# Altium schematic symbol library BaseStation_1.SCHLIB: 202 symbols (part 1 of 2)
Pins are listed as number, name and electrical type; pins without a type are passive.

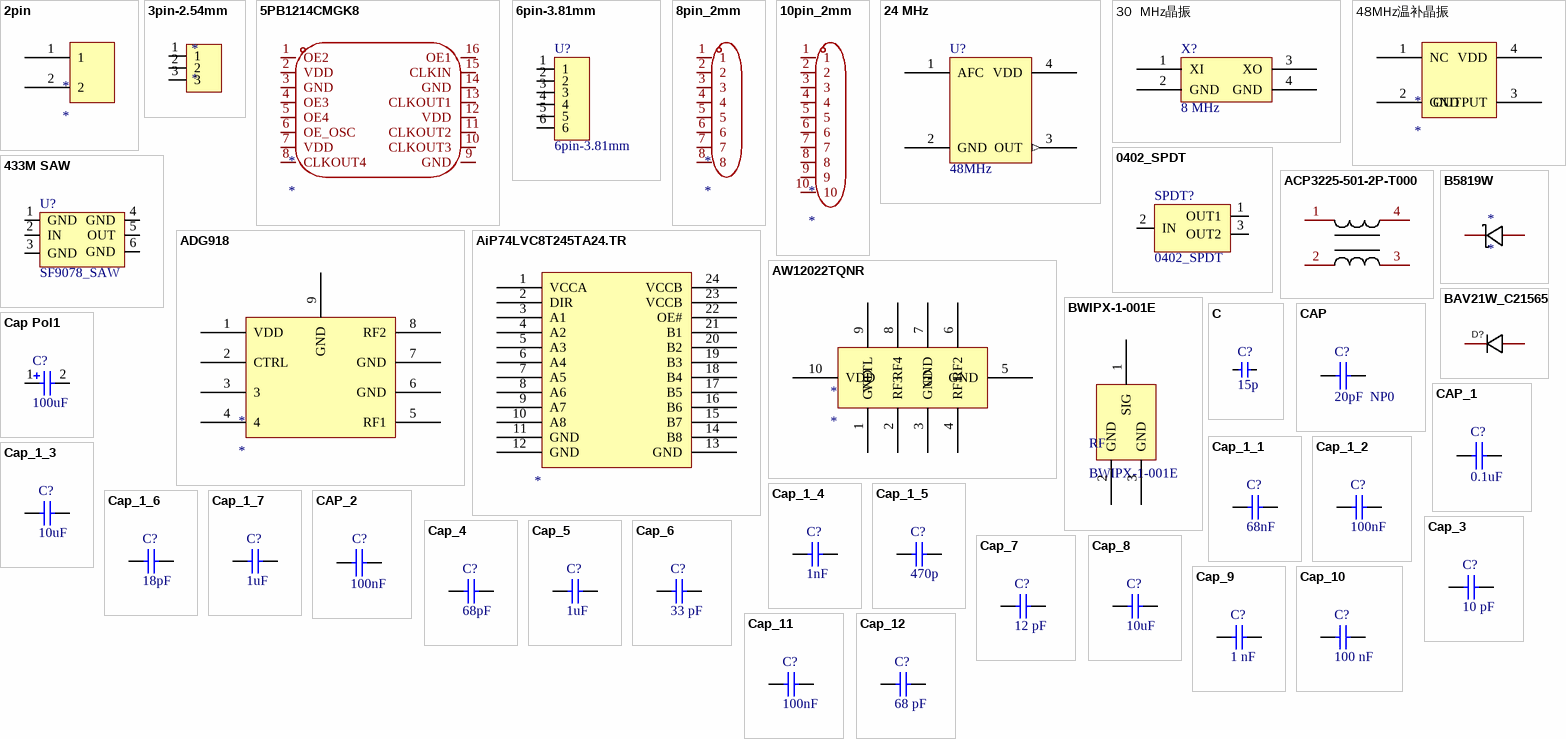
[diagram p0: symbols 2pin to Cap_12]

## 2pin
designator *
pins: 1, 2

## 3pin-2.54mm
designator *
pins: 1, 2, 3

## 5PB1214CMGK8
designator *
pins: 1 OE2, 2 VDD, 3 GND, 4 OE3, 5 OE4, 6 OE_OSC, 7 VDD, 8 CLKOUT4, 9 GND, 10 CLKOUT3, 11 CLKOUT2, 12 VDD, 13 CLKOUT1, 14 GND, 15 CLKIN, 16 OE1

## 6pin-3.81mm
designator U?
footprint 6pin-3.81mm
pins: 1, 2, 3, 4, 5, 6

## 8pin_2mm
designator *
pins: 1, 2, 3, 4, 5, 6, 7, 8

## 10pin_2mm
designator *
pins: 1, 2, 3, 4, 5, 6, 7, 8, 9, 10

## 24 MHz
designator U?, comment 48MHz
footprint 晶振5*3.2mm
pins: 1 AFC (power), 2 GND (power), 3 OUT (out), 4 VDD (power)

## 30  MHz晶振
designator X?, comment 8 MHz
footprint 30 MHz晶振
pins: 1 XI, 2 GND, 3 XO, 4 GND

## 48MHz温补晶振
designator *
pins: 1 NC, 2 GND, 3 OUTPUT, 4 VDD

## 0402_SPDT
designator SPDT?
footprint 0402_SPDT
pins: 1 OUT1, 2 IN, 3 OUT2

## 433M SAW
designator U?, comment SF9078_SAW
footprint WFG99A0433CG (433M SAW)
footprint BPF
pins: 1 GND, 2 IN, 3 GND, 4 GND, 5 OUT, 6 GND

## ACP3225-501-2P-T000
designator L?  (value not drawn)
Manufacturer: TDK; Add into BOM: yes; Number of Lines: 2; Impedance @ Frequency: 500Ω@100MHz; Current Rating: 2A; DC Resistance (DCR): 40mΩ; Voltage Rating - DC: 60V; Withstanding Voltage: 125V; Name: ACP3225-501-2P-T000; Symbol: ACP3225-501-2P-T000; Device: ACP3225-501-2P-T000; LCSC Part Name: ACP3225-501-2P-T000; Supplier Part: C78245; Manufacturer Part: ACP3225-501-2P-T000; Supplier Footprint: 1210-4P; JLCPCB Part Class: Extended Part; Datasheet: https://atta.szlcsc.com/upload/public/pdf/source/20161229/1482979307382.pdf; Supplier: LCSC; Convert to PCB: yes; Operating Temperature: -40℃~+85℃
footprint FILTER-SMD_4P-L3.2-W2.5-BL_ACT1210
3D model FILTER-SMD_4P-L3.2-W2.5-H1.9
pins: 1, 2, 3, 4

## ADG918
designator *
pins: 1 VDD, 2 CTRL, 3, 4, 5 RF1, 6 GND, 7 GND, 8 RF2, 9 GND

## AiP74LVC8T245TA24.TR
designator ?
具有三态输出的8位双电源转换收发器，可实现双向电平转换
pins: 1 VCCA, 2 DIR, 3 A1, 4 A2, 5 A3, 6 A4, 7 A5, 8 A6, 9 A7, 10 A8, 11 GND, 12 GND, 13 GND, 14 B8, 15 B7, 16 B6, 17 B5, 18 B4, 19 B3, 20 B2, 21 B1, 22 OE#, 23 VCCB, 24 VCCB

## AW12022TQNR
designator *
pins: 1 GND, 2 RF3, 3 GND, 4 RF1, 5 GND, 6 RF2, 7 GND, 8 RF4, 9 VCTL, 10 VDD

## B5819W
designator *
肖特基二极管
footprint BW5819W (肖特基二极管)
pins: 1 K, 2 A

## BAV21W_C21565
designator D?  (value not drawn)
Manufacturer: CJ(江苏长电/长晶); Name: BAV21W; Add into BOM: yes; Diode Configuration: 独立式; Power Dissipation: 500mW; Reverse Voltage (Vr): 200V; Average Rectified Current (Io): 200mA; Forward Voltage (Vf@If): 1.25V@200mA; Reverse Leakage Current: 100nA@200V; Reverse Recovery Time (trr): 50ns; Symbol: BAV21W; Device: BAV21W_C21565; LCSC Part Name: BAV21W  T3; Supplier Part: C21565; Manufacturer Part: BAV21W; Supplier Footprint: SOD-123; JLCPCB Part Class: Extended Part; Datasheet: https://atta.szlcsc.com/upload/public/pdf/source/20140301/1457707002435.pdf; Supplier: LCSC; Convert to PCB: yes; Operating Temperature: +150℃@(Tj)
footprint SOD-123_L2.8-W1.8-LS3.7-RD
3D model SOD-123_L2.8-W1.8-LS3.7-RD
pins: 1 C, 2 A

## BWIPX-1-001E
designator RF
pins: 1 SIG, 2 GND, 3 GND

## C
designator C?  value 15p  (hidden comment: C)
Capacitor; Published: 8-Jun-2000; LatestRevisionDate: 17-Jul-2002; LatestRevisionNote: Re-released for DXP Platform.; PackageReference: RAD-0.3; Publisher: Altium Limited; PackageDescription: Radial Cap, Thru-Hole; 2 Leads; 0.3 in Pin Spacing
simulation model CAP (Capacitor)
signal-integrity model Cap
footprint C 0402 (无极性贴片电容)
footprint 0603_Z
pins: 1, 2

## CAP
designator C?, comment 20pF  NP0
0402; Value: 20pF  NP0
footprint LC-0603_C
footprint LC-0402_C
footprint 0402_Z
pins: 1, 2
2 alternate drawings of the same symbol

## Cap Pol1
designator C?, comment 100uF
Polarized Capacitor (Radial); Published: 8-Jun-2000; LatestRevisionDate: 17-Jul-2002; LatestRevisionNote: Re-released for DXP Platform.; PackageReference: RB7.6-15; Publisher: Altium Limited; Value: 100uF
footprint LC-CASE-A_3216
3D model 钽电容_B (PCB3D Model)
footprint CAP TAN-D 7343C+
footprint CAP TAN-B 3528C+
footprint 1210C
footprint 1210
footprint 0805_Z
pins: 1, 2
1 alternate drawing of the same symbol

## CAP_1
designator C?, comment 0.1uF
0402; Value: 0.1uF
footprint LC-0603_C
footprint LC-0402_C
footprint 0402_Z
pins: 1, 2
2 alternate drawings of the same symbol

## Cap_1_1
designator C?, comment 68nF
Capacitor; Published: 8-Jun-2000; LatestRevisionDate: 17-Jul-2002; LatestRevisionNote: Re-released for DXP Platform.; PackageReference: RAD-0.3; Publisher: Altium Limited; Value: 68nF
simulation model CAP (Capacitor)
signal-integrity model Cap
footprint 0402C
footprint 0805C
pins: 1, 2

## Cap_1_2
designator C?, comment 100nF
Capacitor; Published: 8-Jun-2000; LatestRevisionDate: 17-Jul-2002; LatestRevisionNote: Re-released for DXP Platform.; PackageReference: RAD-0.3; Publisher: Altium Limited; Value: 100nF
simulation model CAP (Capacitor)
signal-integrity model Cap
footprint 0603C
pins: 1, 2

## Cap_1_3
designator C?, comment 10uF
Capacitor; Published: 8-Jun-2000; LatestRevisionDate: 17-Jul-2002; LatestRevisionNote: Re-released for DXP Platform.; PackageReference: RAD-0.3; Publisher: Altium Limited; Value: 10uF
simulation model CAP (Capacitor)
signal-integrity model Cap
footprint 0402C
footprint 0603
footprint 0805C
pins: 1, 2

## Cap_1_4
designator C?, comment 1nF
Capacitor; Published: 8-Jun-2000; LatestRevisionDate: 17-Jul-2002; LatestRevisionNote: Re-released for DXP Platform.; PackageReference: RAD-0.3; Publisher: Altium Limited; Value: 1nF
simulation model CAP (Capacitor)
signal-integrity model Cap
footprint 0402C
footprint 0603
pins: 1, 2

## Cap_1_5
designator C?, comment 470p
Capacitor; Published: 8-Jun-2000; LatestRevisionDate: 17-Jul-2002; LatestRevisionNote: Re-released for DXP Platform.; PackageReference: RAD-0.3; Publisher: Altium Limited; Value: 470p
simulation model CAP (Capacitor)
signal-integrity model Cap
footprint 0402C
footprint 0603C
pins: 1, 2

## Cap_1_6
designator C?, comment 18pF
Capacitor; Published: 8-Jun-2000; LatestRevisionDate: 17-Jul-2002; LatestRevisionNote: Re-released for DXP Platform.; PackageReference: RAD-0.3; Publisher: Altium Limited; Value: 18pF
simulation model CAP (Capacitor)
signal-integrity model Cap
footprint 0402C
pins: 1, 2

## Cap_1_7
designator C?, comment 1uF
Capacitor; Published: 8-Jun-2000; LatestRevisionDate: 17-Jul-2002; LatestRevisionNote: Re-released for DXP Platform.; PackageReference: RAD-0.3; Publisher: Altium Limited; Value: 1uF
simulation model CAP (Capacitor)
signal-integrity model Cap
footprint 0402C
pins: 1, 2

## CAP_2
designator C?, comment 100nF
0402; Value: 0.1uF
footprint LC-0603_C
footprint LC-0402_C
footprint 0402_Z
pins: 1, 2
2 alternate drawings of the same symbol

## Cap_3
designator C?, comment 10 pF
Capacitor; Value: 100pF; Published: 8-Jun-2000; LatestRevisionDate: 17-Jul-2002; LatestRevisionNote: Re-released for DXP Platform.; PackageReference: RAD-0.3; Publisher: Altium Limited; PackageDescription: Radial Cap, Thru-Hole; 2 Leads; 0.3 in Pin Spacing
footprint RAD-0.3 (Radial Cap, Thru-Hole; 2 Leads; 0.3 in Pin Spacing)
simulation model CAP (Capacitor)
signal-integrity model Cap
footprint 0402C
footprint 0402_Z
pins: 1, 2

## Cap_4
designator C?, comment 68pF
Capacitor; Value: 100pF; Published: 8-Jun-2000; LatestRevisionDate: 17-Jul-2002; LatestRevisionNote: Re-released for DXP Platform.; PackageReference: RAD-0.3; Publisher: Altium Limited; PackageDescription: Radial Cap, Thru-Hole; 2 Leads; 0.3 in Pin Spacing
footprint RAD-0.3 (Radial Cap, Thru-Hole; 2 Leads; 0.3 in Pin Spacing)
simulation model CAP (Capacitor)
signal-integrity model Cap
footprint 0402C
footprint 0402_Z
pins: 1, 2

## Cap_5
designator C?, comment 1uF
Capacitor; Value: 100pF; Published: 8-Jun-2000; LatestRevisionDate: 17-Jul-2002; LatestRevisionNote: Re-released for DXP Platform.; PackageReference: RAD-0.3; Publisher: Altium Limited; PackageDescription: Radial Cap, Thru-Hole; 2 Leads; 0.3 in Pin Spacing
footprint RAD-0.3 (Radial Cap, Thru-Hole; 2 Leads; 0.3 in Pin Spacing)
simulation model CAP (Capacitor)
signal-integrity model Cap
footprint 0402C
footprint 0402_Z
pins: 1, 2

## Cap_6
designator C?, comment 33 pF
Capacitor; Value: 100pF; Published: 8-Jun-2000; LatestRevisionDate: 17-Jul-2002; LatestRevisionNote: Re-released for DXP Platform.; PackageReference: RAD-0.3; Publisher: Altium Limited; PackageDescription: Radial Cap, Thru-Hole; 2 Leads; 0.3 in Pin Spacing
footprint RAD-0.3 (Radial Cap, Thru-Hole; 2 Leads; 0.3 in Pin Spacing)
simulation model CAP (Capacitor)
signal-integrity model Cap
footprint 0402C
footprint LC-0402_L
footprint N_0402_C
footprint 0402_Z
pins: 1, 2

## Cap_7
designator C?, comment 12 pF
Capacitor; Value: 100pF; Published: 8-Jun-2000; LatestRevisionDate: 17-Jul-2002; LatestRevisionNote: Re-released for DXP Platform.; PackageReference: RAD-0.3; Publisher: Altium Limited; PackageDescription: Radial Cap, Thru-Hole; 2 Leads; 0.3 in Pin Spacing
footprint RAD-0.3 (Radial Cap, Thru-Hole; 2 Leads; 0.3 in Pin Spacing)
simulation model CAP (Capacitor)
signal-integrity model Cap
footprint 0402C
footprint 0402_Z
footprint LC-0402_C
pins: 1, 2

## Cap_8
designator C?, comment 10uF
Capacitor; Value: 100pF; Published: 8-Jun-2000; LatestRevisionDate: 17-Jul-2002; LatestRevisionNote: Re-released for DXP Platform.; PackageReference: RAD-0.3; Publisher: Altium Limited; PackageDescription: Radial Cap, Thru-Hole; 2 Leads; 0.3 in Pin Spacing
footprint RAD-0.3 (Radial Cap, Thru-Hole; 2 Leads; 0.3 in Pin Spacing)
simulation model CAP (Capacitor)
signal-integrity model Cap
footprint 0402C
footprint 0603C
footprint 0603_Z
pins: 1, 2

## Cap_9
designator C?, comment 1 nF
Capacitor; Value: 100pF; Published: 8-Jun-2000; LatestRevisionDate: 17-Jul-2002; LatestRevisionNote: Re-released for DXP Platform.; PackageReference: RAD-0.3; Publisher: Altium Limited; PackageDescription: Radial Cap, Thru-Hole; 2 Leads; 0.3 in Pin Spacing
footprint RAD-0.3 (Radial Cap, Thru-Hole; 2 Leads; 0.3 in Pin Spacing)
simulation model CAP (Capacitor)
signal-integrity model Cap
footprint 0402C
footprint 0402_Z
pins: 1, 2

## Cap_10
designator C?, comment 100 nF
Capacitor; Value: 100pF; Published: 8-Jun-2000; LatestRevisionDate: 17-Jul-2002; LatestRevisionNote: Re-released for DXP Platform.; PackageReference: RAD-0.3; Publisher: Altium Limited; PackageDescription: Radial Cap, Thru-Hole; 2 Leads; 0.3 in Pin Spacing
footprint RAD-0.3 (Radial Cap, Thru-Hole; 2 Leads; 0.3 in Pin Spacing)
simulation model CAP (Capacitor)
signal-integrity model Cap
footprint 0402C
footprint 0402_Z
pins: 1, 2

## Cap_11
designator C?, comment 100nF
Capacitor; Value: 100pF; Published: 8-Jun-2000; LatestRevisionDate: 17-Jul-2002; LatestRevisionNote: Re-released for DXP Platform.; PackageReference: RAD-0.3; Publisher: Altium Limited; PackageDescription: Radial Cap, Thru-Hole; 2 Leads; 0.3 in Pin Spacing
footprint RAD-0.3 (Radial Cap, Thru-Hole; 2 Leads; 0.3 in Pin Spacing)
simulation model CAP (Capacitor)
signal-integrity model Cap
footprint 0402C
footprint 0402_Z
pins: 1, 2

## Cap_12
designator C?, comment 68 pF
Capacitor; Value: 100pF; Published: 8-Jun-2000; LatestRevisionDate: 17-Jul-2002; LatestRevisionNote: Re-released for DXP Platform.; PackageReference: RAD-0.3; Publisher: Altium Limited; PackageDescription: Radial Cap, Thru-Hole; 2 Leads; 0.3 in Pin Spacing
footprint RAD-0.3 (Radial Cap, Thru-Hole; 2 Leads; 0.3 in Pin Spacing)
simulation model CAP (Capacitor)
signal-integrity model Cap
footprint 0402C
footprint 0402_Z
pins: 1, 2

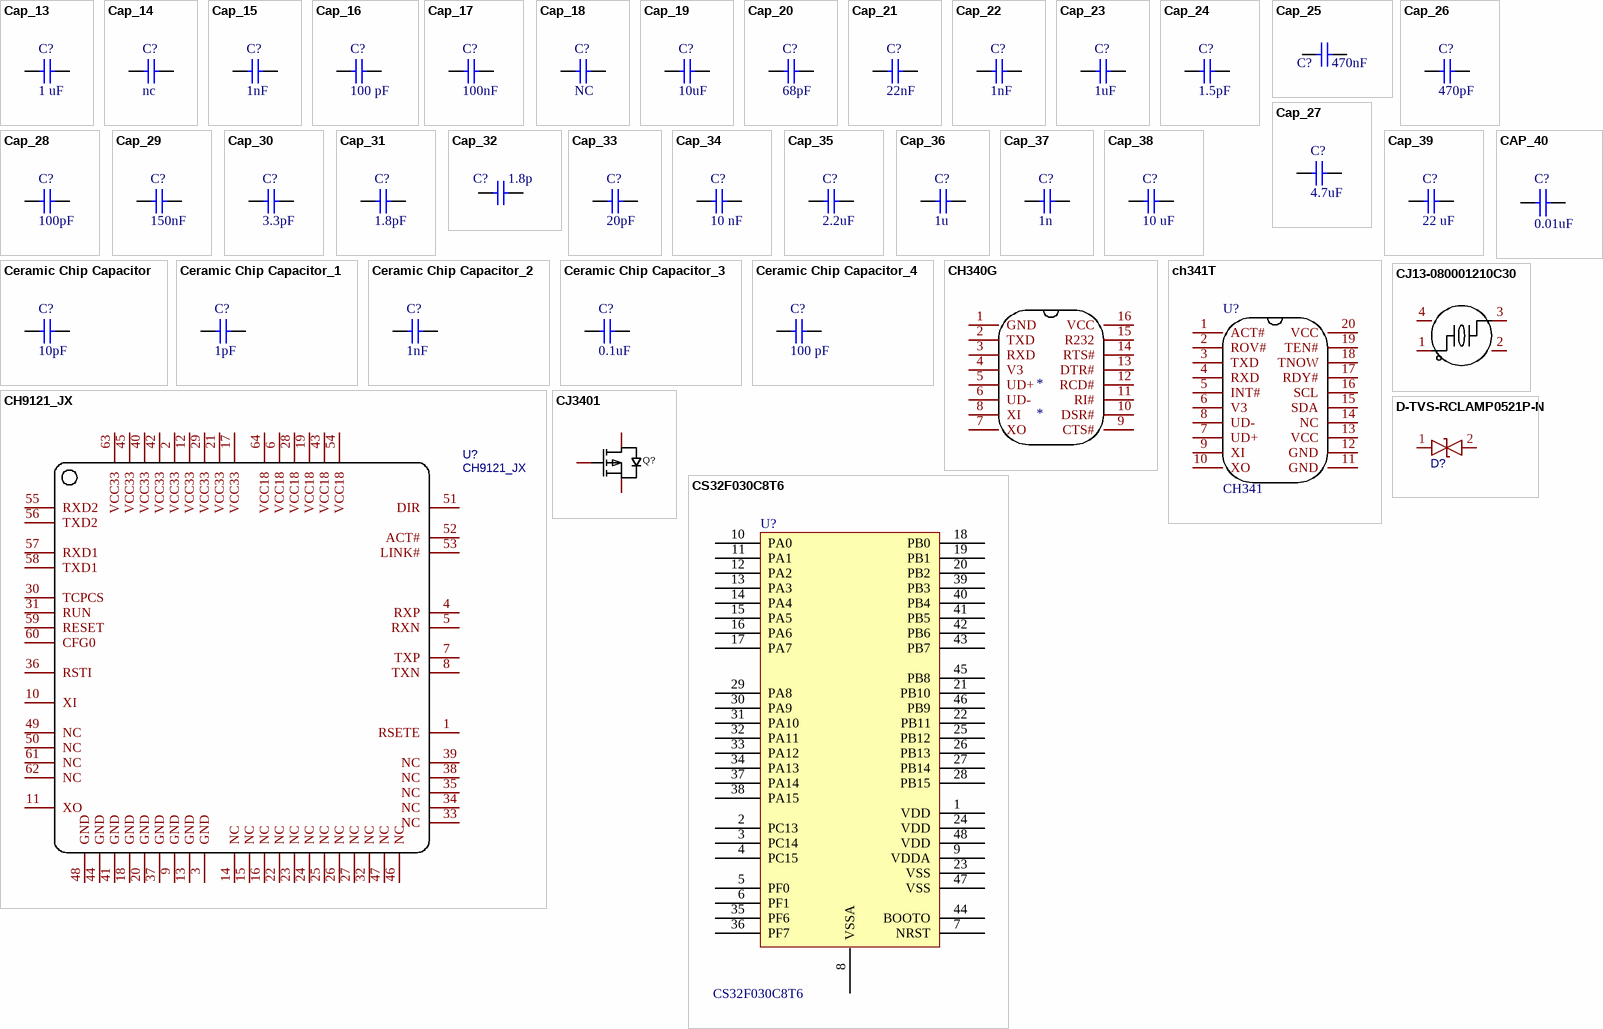
[diagram p1: symbols Cap_13 to D-TVS-RCLAMP0521P-N]

## Cap_13
designator C?, comment 1 uF
Capacitor; Value: 100pF; Published: 8-Jun-2000; LatestRevisionDate: 17-Jul-2002; LatestRevisionNote: Re-released for DXP Platform.; PackageReference: RAD-0.3; Publisher: Altium Limited; PackageDescription: Radial Cap, Thru-Hole; 2 Leads; 0.3 in Pin Spacing
footprint RAD-0.3 (Radial Cap, Thru-Hole; 2 Leads; 0.3 in Pin Spacing)
simulation model CAP (Capacitor)
signal-integrity model Cap
footprint 0402C
footprint 0402_Z
pins: 1, 2

## Cap_14
designator C?, comment nc
Capacitor; Value: 100pF; Published: 8-Jun-2000; LatestRevisionDate: 17-Jul-2002; LatestRevisionNote: Re-released for DXP Platform.; PackageReference: RAD-0.3; Publisher: Altium Limited; PackageDescription: Radial Cap, Thru-Hole; 2 Leads; 0.3 in Pin Spacing
footprint RAD-0.3 (Radial Cap, Thru-Hole; 2 Leads; 0.3 in Pin Spacing)
simulation model CAP (Capacitor)
signal-integrity model Cap
footprint 0402C
footprint 0402_Z
pins: 1, 2

## Cap_15
designator C?, comment 1nF
Capacitor; Value: 100pF; Published: 8-Jun-2000; LatestRevisionDate: 17-Jul-2002; LatestRevisionNote: Re-released for DXP Platform.; PackageReference: RAD-0.3; Publisher: Altium Limited; PackageDescription: Radial Cap, Thru-Hole; 2 Leads; 0.3 in Pin Spacing
footprint RAD-0.3 (Radial Cap, Thru-Hole; 2 Leads; 0.3 in Pin Spacing)
simulation model CAP (Capacitor)
signal-integrity model Cap
footprint 0402C
footprint 0402_Z
pins: 1, 2

## Cap_16
designator C?, comment 100 pF
Capacitor; Value: 100pF; Published: 8-Jun-2000; LatestRevisionDate: 17-Jul-2002; LatestRevisionNote: Re-released for DXP Platform.; PackageReference: RAD-0.3; Publisher: Altium Limited; PackageDescription: Radial Cap, Thru-Hole; 2 Leads; 0.3 in Pin Spacing
footprint RAD-0.3 (Radial Cap, Thru-Hole; 2 Leads; 0.3 in Pin Spacing)
simulation model CAP (Capacitor)
signal-integrity model Cap
footprint 0402C
footprint 0402_Z
pins: 1, 2

## Cap_17
designator C?, comment 100nF
Capacitor; Published: 8-Jun-2000; LatestRevisionDate: 17-Jul-2002; LatestRevisionNote: Re-released for DXP Platform.; PackageReference: RAD-0.3; Publisher: Altium Limited; Value: 100nF
simulation model CAP (Capacitor)
signal-integrity model Cap
footprint LC-0402_C
footprint LC-0603_C
footprint LC-0805_C
footprint N_0402_C
footprint 0402C
footprint 0402_Z
pins: 1, 2

## Cap_18
designator C?, comment NC
Capacitor; Published: 8-Jun-2000; LatestRevisionDate: 17-Jul-2002; LatestRevisionNote: Re-released for DXP Platform.; PackageReference: RAD-0.3; Publisher: Altium Limited; Value: NC
simulation model CAP (Capacitor)
signal-integrity model Cap
footprint LC-0402_C
footprint LC-0603_C
footprint LC-0805_C
footprint 0603C
footprint LC-0402_C
footprint 0402_Z
pins: 1, 2

## Cap_19
designator C?, comment 10uF
Capacitor; Published: 8-Jun-2000; LatestRevisionDate: 17-Jul-2002; LatestRevisionNote: Re-released for DXP Platform.; PackageReference: RAD-0.3; Publisher: Altium Limited; Value: 10uF
simulation model CAP (Capacitor)
signal-integrity model Cap
footprint LC-0402_C
footprint LC-0603_C
footprint LC-0805_C
footprint 0603C
footprint 0603_Z
pins: 1, 2

## Cap_20
designator C?, comment 68pF
Capacitor; Published: 8-Jun-2000; LatestRevisionDate: 17-Jul-2002; LatestRevisionNote: Re-released for DXP Platform.; PackageReference: RAD-0.3; Publisher: Altium Limited; Value: 68pF
simulation model CAP (Capacitor)
signal-integrity model Cap
footprint LC-0402_C
footprint LC-0603_C
footprint LC-0805_C
footprint 0402C
footprint 0402_Z
pins: 1, 2

## Cap_21
designator C?, comment 22nF
Capacitor; Published: 8-Jun-2000; LatestRevisionDate: 17-Jul-2002; LatestRevisionNote: Re-released for DXP Platform.; PackageReference: RAD-0.3; Publisher: Altium Limited; Value: 22nF
simulation model CAP (Capacitor)
signal-integrity model Cap
footprint LC-0402_C
footprint LC-0603_C
footprint LC-0805_C
footprint 0402C
footprint 0402_Z
pins: 1, 2

## Cap_22
designator C?, comment 1nF
Capacitor; Published: 8-Jun-2000; LatestRevisionDate: 17-Jul-2002; LatestRevisionNote: Re-released for DXP Platform.; PackageReference: RAD-0.3; Publisher: Altium Limited; Value: 1nF
simulation model CAP (Capacitor)
signal-integrity model Cap
footprint LC-0402_C
footprint LC-0603_C
footprint LC-0805_C
footprint 0402C
footprint 0402_Z
pins: 1, 2

## Cap_23
designator C?, comment 1uF
Capacitor; Published: 8-Jun-2000; LatestRevisionDate: 17-Jul-2002; LatestRevisionNote: Re-released for DXP Platform.; PackageReference: RAD-0.3; Publisher: Altium Limited; Value: 1uF
simulation model CAP (Capacitor)
signal-integrity model Cap
footprint LC-0402_C
footprint LC-0603_C
footprint LC-0805_C
footprint 0402C
footprint 0402_Z
pins: 1, 2

## Cap_24
designator C?, comment 1.5pF
Capacitor; Value: 100pF; Published: 8-Jun-2000; LatestRevisionDate: 17-Jul-2002; LatestRevisionNote: Re-released for DXP Platform.; PackageReference: RAD-0.3; Publisher: Altium Limited; PackageDescription: Radial Cap, Thru-Hole; 2 Leads; 0.3 in Pin Spacing
footprint RAD-0.3 (Radial Cap, Thru-Hole; 2 Leads; 0.3 in Pin Spacing)
simulation model CAP (Capacitor)
signal-integrity model Cap
footprint 0402C
footprint 0402_Z
pins: 1, 2

## Cap_25
designator C?, comment 470nF
Capacitor; Value: 100pF; Published: 8-Jun-2000; LatestRevisionDate: 17-Jul-2002; LatestRevisionNote: Re-released for DXP Platform.; PackageReference: RAD-0.3; Publisher: Altium Limited; PackageDescription: Radial Cap, Thru-Hole; 2 Leads; 0.3 in Pin Spacing
footprint RAD-0.3 (Radial Cap, Thru-Hole; 2 Leads; 0.3 in Pin Spacing)
simulation model CAP (Capacitor)
signal-integrity model Cap
footprint 0402C
footprint 1210C
footprint 0402C_2
footprint 0402_Z
pins: 1, 2

## Cap_26
designator C?, comment 470pF
Capacitor; Value: 100pF; Published: 8-Jun-2000; LatestRevisionDate: 17-Jul-2002; LatestRevisionNote: Re-released for DXP Platform.; PackageReference: RAD-0.3; Publisher: Altium Limited; PackageDescription: Radial Cap, Thru-Hole; 2 Leads; 0.3 in Pin Spacing
footprint RAD-0.3 (Radial Cap, Thru-Hole; 2 Leads; 0.3 in Pin Spacing)
simulation model CAP (Capacitor)
signal-integrity model Cap
footprint 0402C
footprint 1210C
footprint 0402C_2
footprint 0402_Z
pins: 1, 2

## Cap_27
designator C?, comment 4.7uF
Capacitor; Value: 100pF; Published: 8-Jun-2000; LatestRevisionDate: 17-Jul-2002; LatestRevisionNote: Re-released for DXP Platform.; PackageReference: RAD-0.3; Publisher: Altium Limited; PackageDescription: Radial Cap, Thru-Hole; 2 Leads; 0.3 in Pin Spacing
footprint RAD-0.3 (Radial Cap, Thru-Hole; 2 Leads; 0.3 in Pin Spacing)
simulation model CAP (Capacitor)
signal-integrity model Cap
footprint 0402C
footprint 1210C
footprint 0402C_2
footprint 0402_Z
footprint 0603
pins: 1, 2

## Cap_28
designator C?, comment 100pF
Capacitor; Published: 8-Jun-2000; LatestRevisionDate: 17-Jul-2002; LatestRevisionNote: Re-released for DXP Platform.; PackageReference: RAD-0.3; Publisher: Altium Limited; PackageDescription: Radial Cap, Thru-Hole; 2 Leads; 0.3 in Pin Spacing; Value: 100pF
footprint RAD-0.3 (Radial Cap, Thru-Hole; 2 Leads; 0.3 in Pin Spacing)
simulation model CAP (Capacitor)
signal-integrity model Cap
footprint 0402C
footprint 1210C
footprint 0402C_2
footprint 0402_Z
pins: 1, 2

## Cap_29
designator C?, comment 150nF
Capacitor; Value: 100pF; Published: 8-Jun-2000; LatestRevisionDate: 17-Jul-2002; LatestRevisionNote: Re-released for DXP Platform.; PackageReference: RAD-0.3; Publisher: Altium Limited; PackageDescription: Radial Cap, Thru-Hole; 2 Leads; 0.3 in Pin Spacing
footprint RAD-0.3 (Radial Cap, Thru-Hole; 2 Leads; 0.3 in Pin Spacing)
simulation model CAP (Capacitor)
signal-integrity model Cap
footprint 0402C
footprint 1210C
footprint 0805_Z
footprint 0402_Z
pins: 1, 2

## Cap_30
designator C?, comment 3.3pF
Capacitor; Value: 100pF; Published: 8-Jun-2000; LatestRevisionDate: 17-Jul-2002; LatestRevisionNote: Re-released for DXP Platform.; PackageReference: RAD-0.3; Publisher: Altium Limited; PackageDescription: Radial Cap, Thru-Hole; 2 Leads; 0.3 in Pin Spacing
footprint RAD-0.3 (Radial Cap, Thru-Hole; 2 Leads; 0.3 in Pin Spacing)
simulation model CAP (Capacitor)
signal-integrity model Cap
footprint 0402C
footprint 1210C
footprint 0805_Z
footprint 0402_Z
pins: 1, 2

## Cap_31
designator C?, comment 1.8pF
Capacitor; Value: 100pF; Published: 8-Jun-2000; LatestRevisionDate: 17-Jul-2002; LatestRevisionNote: Re-released for DXP Platform.; PackageReference: RAD-0.3; Publisher: Altium Limited; PackageDescription: Radial Cap, Thru-Hole; 2 Leads; 0.3 in Pin Spacing
footprint RAD-0.3 (Radial Cap, Thru-Hole; 2 Leads; 0.3 in Pin Spacing)
simulation model CAP (Capacitor)
signal-integrity model Cap
footprint 0402C
footprint 1210C
footprint 0805_Z
footprint 0402_Z
pins: 1, 2

## Cap_32
designator C?, comment 1.8p
Capacitor; Value: 100pF; Published: 8-Jun-2000; LatestRevisionDate: 17-Jul-2002; LatestRevisionNote: Re-released for DXP Platform.; PackageReference: RAD-0.3; Publisher: Altium Limited; PackageDescription: Radial Cap, Thru-Hole; 2 Leads; 0.3 in Pin Spacing
footprint RAD-0.3 (Radial Cap, Thru-Hole; 2 Leads; 0.3 in Pin Spacing)
simulation model CAP (Capacitor)
signal-integrity model Cap
footprint 0402C
footprint 1210C
footprint 0805_Z
footprint 0402_Z
pins: 1, 2

## Cap_33
designator C?, comment 20pF
Capacitor; Value: 100pF; Published: 8-Jun-2000; LatestRevisionDate: 17-Jul-2002; LatestRevisionNote: Re-released for DXP Platform.; PackageReference: RAD-0.3; Publisher: Altium Limited; PackageDescription: Radial Cap, Thru-Hole; 2 Leads; 0.3 in Pin Spacing
footprint RAD-0.3 (Radial Cap, Thru-Hole; 2 Leads; 0.3 in Pin Spacing)
simulation model CAP (Capacitor)
signal-integrity model Cap
footprint 0402C
footprint 0402_Z
pins: 1, 2

## Cap_34
designator C?, comment 10 nF
Capacitor; Value: 100pF; Published: 8-Jun-2000; LatestRevisionDate: 17-Jul-2002; LatestRevisionNote: Re-released for DXP Platform.; PackageReference: RAD-0.3; Publisher: Altium Limited; PackageDescription: Radial Cap, Thru-Hole; 2 Leads; 0.3 in Pin Spacing
footprint RAD-0.3 (Radial Cap, Thru-Hole; 2 Leads; 0.3 in Pin Spacing)
simulation model CAP (Capacitor)
signal-integrity model Cap
footprint 0402C
footprint 0603C
footprint 0402C
footprint 0402_Z
pins: 1, 2

## Cap_35
designator C?, comment 2.2uF
Capacitor; Value: 100pF; Published: 8-Jun-2000; LatestRevisionDate: 17-Jul-2002; LatestRevisionNote: Re-released for DXP Platform.; PackageReference: RAD-0.3; Publisher: Altium Limited; PackageDescription: Radial Cap, Thru-Hole; 2 Leads; 0.3 in Pin Spacing
footprint RAD-0.3 (Radial Cap, Thru-Hole; 2 Leads; 0.3 in Pin Spacing)
simulation model CAP (Capacitor)
signal-integrity model Cap
footprint 0402C
footprint 0603C
footprint 0402C
footprint 0402_Z
pins: 1, 2

## Cap_36
designator C?, comment 1u
Capacitor; Value: 100pF; Published: 8-Jun-2000; LatestRevisionDate: 17-Jul-2002; LatestRevisionNote: Re-released for DXP Platform.; PackageReference: RAD-0.3; Publisher: Altium Limited; PackageDescription: Radial Cap, Thru-Hole; 2 Leads; 0.3 in Pin Spacing
footprint RAD-0.3 (Radial Cap, Thru-Hole; 2 Leads; 0.3 in Pin Spacing)
simulation model CAP (Capacitor)
signal-integrity model Cap
footprint 0402C
footprint 0603C
footprint 0402_Z
footprint 0402_Z
pins: 1, 2

## Cap_37
designator C?, comment 1n
Capacitor; Value: 100pF; Published: 8-Jun-2000; LatestRevisionDate: 17-Jul-2002; LatestRevisionNote: Re-released for DXP Platform.; PackageReference: RAD-0.3; Publisher: Altium Limited; PackageDescription: Radial Cap, Thru-Hole; 2 Leads; 0.3 in Pin Spacing
footprint RAD-0.3 (Radial Cap, Thru-Hole; 2 Leads; 0.3 in Pin Spacing)
simulation model CAP (Capacitor)
signal-integrity model Cap
footprint 0402C
footprint 0603C
footprint 0402_Z
footprint 0402_Z
pins: 1, 2

## Cap_38
designator C?, comment 10 uF
Capacitor; Value: 100pF; Published: 8-Jun-2000; LatestRevisionDate: 17-Jul-2002; LatestRevisionNote: Re-released for DXP Platform.; PackageReference: RAD-0.3; Publisher: Altium Limited; PackageDescription: Radial Cap, Thru-Hole; 2 Leads; 0.3 in Pin Spacing
footprint RAD-0.3 (Radial Cap, Thru-Hole; 2 Leads; 0.3 in Pin Spacing)
simulation model CAP (Capacitor)
signal-integrity model Cap
footprint 0402C
footprint 1210
footprint 1210_LAB
footprint 1210_Z
footprint 0805C
pins: 1, 2

## Cap_39
designator C?, comment 22 uF
Capacitor; Value: 100pF; Published: 8-Jun-2000; LatestRevisionDate: 17-Jul-2002; LatestRevisionNote: Re-released for DXP Platform.; PackageReference: RAD-0.3; Publisher: Altium Limited; PackageDescription: Radial Cap, Thru-Hole; 2 Leads; 0.3 in Pin Spacing
footprint RAD-0.3 (Radial Cap, Thru-Hole; 2 Leads; 0.3 in Pin Spacing)
simulation model CAP (Capacitor)
signal-integrity model Cap
footprint 0402C
footprint 1210
footprint 1210_LAB
footprint 1210_Z
pins: 1, 2

## CAP_40
designator C?, comment 0.01uF
0402; Value: 0.01uF
footprint LC-0603_C
footprint LC-0402_C
footprint 0402_Z
pins: 1, 2
2 alternate drawings of the same symbol

## Ceramic Chip Capacitor
designator C?, comment 10pF
Ceramic Capacitor - Standard; DNS: Do Not Stuff Part; Note: *; Value: 10pF
footprint 0402C
footprint 0402_LAB
footprint 0402_Z
pins: 1, 2

## Ceramic Chip Capacitor_1
designator C?, comment 1pF
Ceramic Capacitor - Standard; DNS: Do Not Stuff Part; Note: *; Value: 1pF
footprint 0402C
footprint 0402_LAB
footprint 0402_Z
pins: 1, 2

## Ceramic Chip Capacitor_2
designator C?, comment value 1nF  (hidden comment: 10nF)
Ceramic Capacitor - Standard; DNS: Do Not Stuff Part; Note: *
footprint 0402C
footprint 0402_LAB
footprint 0402_Z
pins: 1, 2

## Ceramic Chip Capacitor_3
designator C?, comment value 0.1uF  (hidden comment: 1uF)
Ceramic Capacitor - Standard; DNS: Do Not Stuff Part; Note: *
footprint 0402C
footprint 0402_LAB
footprint 0402_Z
pins: 1, 2

## Ceramic Chip Capacitor_4
designator C?, comment 100 pF
Ceramic Capacitor - Standard; DNS: Do Not Stuff Part; Note: *; Value: 100 pF
footprint 0402C
footprint 0402_LAB
footprint 0402_Z
pins: 1, 2

## CH340G
designator *
pins: 1 GND, 2 TXD, 3 RXD, 4 V3, 5 UD+, 6 UD-, 7 XO, 8 XI, 9 CTS#, 10 DSR#, 11 RI#, 12 RCD#, 13 DTR#, 14 RTS#, 15 R232, 16 VCC

## ch341T
designator U?, comment CH341
footprint CH341T
pins: 1 ACT#, 2 ROV#, 3 TXD, 4 RXD, 5 INT#, 6 V3, 7 UD+, 8 UD-, 9 XI, 10 XO, 11 GND, 12 GND, 13 VCC, 14 NC, 15 SDA, 16 SCL, 17 RDY#, 18 TNOW, 19 TEN#, 20 VCC

## CH9121_JX
designator U?
Contributor: jixin001; BOM_Supplier: LCSC; spicePre: U
footprint LQFP-64_L10.0-W10.0-P0.50-LS12.0-BL
pins: 1 RSETE, 2 VCC33, 3 GND, 4 RXP, 5 RXN, 6 VCC18, 7 TXP, 8 TXN, 9 GND, 10 XI, 11 XO, 12 VCC33, 13 GND, 14 NC, 15 NC, 16 NC, 17 VCC33, 18 GND, 19 VCC18, 20 GND, 21 VCC33, 22 NC, 23 NC, 24 NC, 25 NC, 26 NC, 27 NC, 28 VCC18, 29 VCC33, 30 TCPCS, 31 RUN, 32 NC, 33 NC, 34 NC, 35 NC, 36 RSTI, 37 GND, 38 NC, 39 NC, 40 VCC33, 41 GND, 42 VCC33, 43 VCC18, 44 GND, 45 VCC33, 46 NC, 47 NC, 48 GND, 49 NC, 50 NC, 51 DIR, 52 ACT#, 53 LINK#, 54 VCC18, 55 RXD2, 56 TXD2, 57 RXD1, 58 TXD1, 59 RESET, 60 CFG0, 61 NC, 62 NC, 63 VCC33, 64 VCC18

## CJ13-080001210C30
designator X?  (value not drawn)
Manufacturer: CJ(江苏长电/长晶); Name: 8MHz; Add into BOM: yes; Value: 8MHz; Load Capacitance: 12pF; Symbol: CJ13-080001210C30; Device: CJ13-080001210C30; LCSC Part Name: 8MHz 12pF; Supplier Part: C2875275; Manufacturer Part: CJ13-080001210C30; Supplier Footprint: SMD3225-4P; JLCPCB Part Class: Extended Part; Datasheet: https://atta.szlcsc.com/upload/public/pdf/source/20211013/0FAD337EB33B5BE9D660099A731DCCD1.pdf; Supplier: LCSC; Convert to PCB: yes
footprint CRYSTAL-SMD_4P-L3.2-W2.5-BL-1
3D model CRYSTAL-SMD_4P-L3.2-W2.5-BL-1
pins: 1, 2 GND, 3, 4 GND

## CJ3401
designator Q?  (value not drawn)
Manufacturer: CJ（江苏长电/长晶）; Add into BOM: yes; Continuous Drain Current (Id): 4.2A; Power Dissipation (Pd): 350mW; Drain Source On Resistance (RDS(on)@Vgs,Id): 65mΩ 4.2A,10V; Drain Source Voltage (Vdss): 30V; Gate Threshold Voltage (Vgs(th)@Id): 1.3V 250μA; Type: P沟道; Name: CJ3401; Symbol: CJ3401; Device: CJ3401; LCSC Part Name: CJ3401; Supplier Part: C13799; Manufacturer Part: CJ3401; Supplier Footprint: SOT-23(SOT-23-3); JLCPCB Part Class: Extended Part; Datasheet: https://atta.szlcsc.com/upload/public/pdf/source/20140815/1457707217656.pdf; Supplier: LCSC; Convert to PCB: yes
footprint SOT-23-3_L2.9-W1.6-P1.90-LS2.8-BR
3D model SOT-23-3L_L2.9-W1.6-H1.1-LS2.8-P0.95
pins: 1 G, 2 S, 3 D

## CS32F030C8T6
designator U?
footprint LQPF48
pins: 1 VDD, 2 PC13, 3 PC14, 4 PC15, 5 PF0, 6 PF1, 7 NRST, 8 VSSA, 9 VDDA, 10 PA0, 11 PA1, 12 PA2, 13 PA3, 14 PA4, 15 PA5, 16 PA6, 17 PA7, 18 PB0, 19 PB1, 20 PB2, 21 PB10, 22 PB11, 23 VSS, 24 VDD, 25 PB12, 26 PB13, 27 PB14, 28 PB15, 29 PA8, 30 PA9, 31 PA10, 32 PA11, 33 PA12, 34 PA13, 35 PF6, 36 PF7, 37 PA14, 38 PA15, 39 PB3, 40 PB4, 41 PB5, 42 PB6, 43 PB7, 44 BOOTO, 45 PB8, 46 PB9, 47 VSS, 48 VDD

## D-TVS-RCLAMP0521P-N
designator D?  (value not drawn)
BOM_Manufacturer: Bourne Semicon (Shenzhen); Contributor: LCSC; BOM_Paste Type: expand; Package Display: Yes; BOM_Supplier: LCSC; BOM_Supplier Part: C316043; BOM_Manufacturer Part: RCLAMP0521P-N; spicePre: D; spiceSymbolName: RCLAMP0521P-N
footprint X1-DFN1006-2_L1.0-W0.6-RD
footprint LC-SOD-323 (SODFL, 2-Leads, Body 1.30x2.60mm, IPC Low Density)
pins: 1, 2

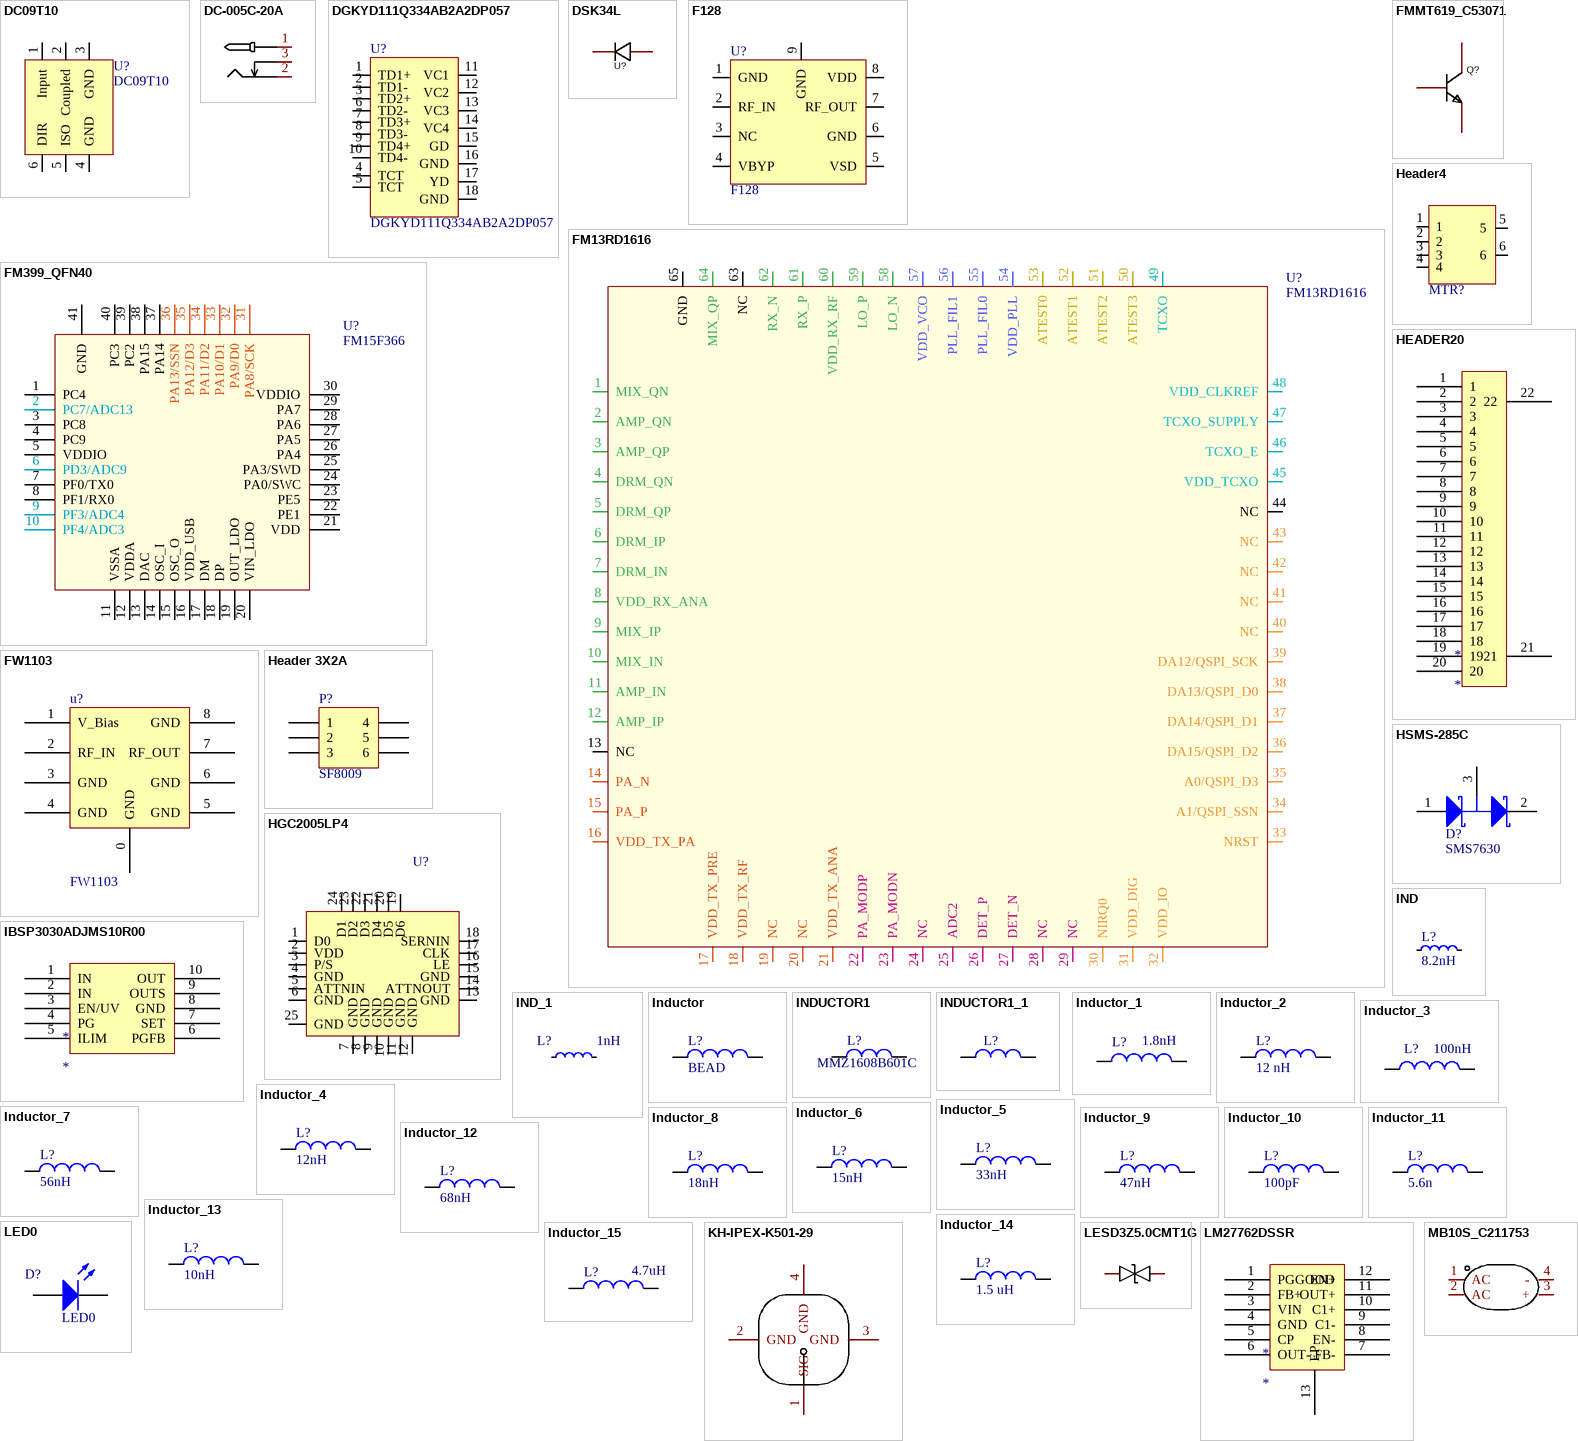
[diagram p2: symbols DC09T10 to MB10S_C211753]

## DC09T10
designator U?
footprint DC09T10
pins: 1 Input, 2 Coupled, 3 GND, 4 GND, 5 ISO, 6 DIR

## DC-005C-20A
designator J?  (value not drawn)
Manufacturer: 韩国韩荣; Add into BOM: yes; Inside Contact Diameter: 2mm; Outside Contact Diameter: 6.4mm; Current Rating (Max): 3A; Voltage Rating (Max): 24V; Name: DC-005C-20A; Symbol: DC-005C-20A; Device: DC-005C-20A; LCSC Part Name: 内径:2mm 外径:6.4mm 高品质; Supplier Part: C84007; Manufacturer Part: DC-005C-20A; Supplier Footprint: 插件; JLCPCB Part Class: Extended Part; Datasheet: https://atta.szlcsc.com/upload/public/pdf/source/20210810/A9F07BBB960FE584CB8DE17AFB8953D7.pdf; Supplier: LCSC; Convert to PCB: yes
3D model DC-IN-TH_DC-005C-20A
footprint DC-IN-TH_DC-005C-20A
pins: 1, 2, 3

## DGKYD111Q334AB2A2DP057
designator U?
footprint DGKYD111Q334AB2A2DP057
pins: 1 TD1+, 2 TD1-, 3 TD2+, 4 TCT, 5 TCT, 6 TD2-, 7 TD3+, 8 TD3-, 9 TD4+, 10 TD4-, 11 VC1, 12 VC2, 13 VC3, 14 VC4, 15 GD, 16 GND, 17 YD, 18 GND

## DSK34L
designator U?  (value not drawn)
Manufacturer: Leiditech(雷卯电子); Add into BOM: yes; Reverse Voltage (Vr): 40V; Average Rectified Current (Io): 3A; Forward Voltage (Vf@If): 420mV@3A; Reverse Leakage Current (Ir): 200uA@40V; Name: DSK34L; Symbol: DSK34L; Device: DSK34L; LCSC Part Name: 40V 3A 420mV@3A; Supplier Part: C2836939; Manufacturer Part: DSK34L; Supplier Footprint: SOD-123FL; JLCPCB Part Class: Extended Part; Datasheet: https://atta.szlcsc.com/upload/public/pdf/source/20210909/D900AB246CF68ECFB4C3379ED796E452.pdf; Supplier: LCSC; Convert to PCB: yes; Diode Configuration: -
footprint SOD-123FL_L3.0-W1.9-LS3.5-RD
3D model SOD-123FL_L3.0-W1.9-LS3.5-RD
pins: 1, 2

## F128
designator U?
footprint F128
pins: 1 GND, 2 RF_IN, 3 NC, 4 VBYP, 5 VSD, 6 GND, 7 RF_OUT, 8 VDD, 9 GND

## FM13RD1616
designator U?
footprint QFN64
footprint FM13RD1616E
pins: 1 MIX_QN, 2 AMP_QN, 3 AMP_QP, 4 DRM_QN, 5 DRM_QP, 6 DRM_IP, 7 DRM_IN, 8 VDD_RX_ANA, 9 MIX_IP, 10 MIX_IN, 11 AMP_IN, 12 AMP_IP, 13 NC, 14 PA_N, 15 PA_P, 16 VDD_TX_PA, 17 VDD_TX_PRE, 18 VDD_TX_RF, 19 NC, 20 NC, 21 VDD_TX_ANA, 22 PA_MODP, 23 PA_MODN, 24 NC, 25 ADC2, 26 DET_P, 27 DET_N, 28 NC, 29 NC, 30 NIRQ0, 31 VDD_DIG, 32 VDD_IO, 33 NRST, 34 A1/QSPI_SSN, 35 A0/QSPI_D3, 36 DA15/QSPI_D2, 37 DA14/QSPI_D1, 38 DA13/QSPI_D0, 39 DA12/QSPI_SCK, 40 NC, 41 NC, 42 NC, 43 NC, 44 NC, 45 VDD_TCXO, 46 TCXO_E, 47 TCXO_SUPPLY, 48 VDD_CLKREF, 49 TCXO, 50 ATEST3, 51 ATEST2, 52 ATEST1, 53 ATEST0, 54 VDD_PLL, 55 PLL_FIL0, 56 PLL_FIL1, 57 VDD_VCO, 58 LO_N, 59 LO_P, 60 VDD_RX_RF, 61 RX_P, 62 RX_N, 63 NC, 64 MIX_QP, 65 GND

## FM399_QFN40
designator U?, comment FM15F366
footprint QFN40 5X5X04P (FM15F336)
pins: 1 PC4, 2 PC7/ADC13, 3 PC8, 4 PC9, 5 VDDIO, 6 PD3/ADC9, 7 PF0/TX0, 8 PF1/RX0, 9 PF3/ADC4, 10 PF4/ADC3, 11 VSSA, 12 VDDA, 13 DAC, 14 OSC_I, 15 OSC_O, 16 VDD_USB, 17 DM, 18 DP, 19 OUT_LDO, 20 VIN_LDO, 21 VDD, 22 PE1, 23 PE5, 24 PA0/SWC, 25 PA3/SWD, 26 PA4, 27 PA5, 28 PA6, 29 PA7, 30 VDDIO, 31 PA8/SCK, 32 PA9/D0, 33 PA10/D1, 34 PA11/D2, 35 PA12/D3, 36 PA13/SSN, 37 PA14, 38 PA15, 39 PC2, 40 PC3, 41 GND

## FMMT619_C53071
designator Q?  (value not drawn)
Manufacturer: CJ（江苏长电/长晶）; Add into BOM: yes; Collector Current (Ic): 2A; Collector-Emitter Breakdown Voltage (Vceo): 50V; Power Dissipation (Pd): 350mW; Transistor Type: NPN; Name: FMMT619; Symbol: FMMT619; Device: FMMT619_C53071; LCSC Part Name: FMMT619; Supplier Part: C53071; Manufacturer Part: FMMT619; Supplier Footprint: SOT-23(SOT-23-3); JLCPCB Part Class: Extended Part; Datasheet: https://atta.szlcsc.com/upload/public/pdf/source/20161024/1477279261456.pdf; Supplier: LCSC; Convert to PCB: yes
footprint SOT-23-3_L2.9-W1.3-P1.90-LS2.4-BR
3D model SOT-23-3P_L2.9-W1.3-H1.0-LS2.4-P0.95
pins: 1 B, 2 E, 3 C

## FW1103
designator u?
footprint FW1103W
pins: 0 GND, 1 V_Bias, 2 RF_IN, 3 GND, 4 GND, 5 GND, 6 GND, 7 RF_OUT, 8 GND

## Header4
designator MTR?, comment P?  (value not drawn)
footprint J4_1.25
footprint J4_1.25
pins: 1, 2, 3, 4, 5, 6

## HEADER20
designator *
footprint Header20
pins: 1, 2, 3, 4, 5, 6, 7, 8, 9, 10, 11, 12, 13, 14, 15, 16, 17, 18, 19, 20, 21, 22

## Header 3X2A
designator P?, comment SF8009
Header, 3-Pin, Dual row; LatestRevisionDate: 17-Jul-2002; LatestRevisionNote: Re-released for DXP Platform.; Publisher: Altium Limited
footprint HDR2X3_CEN (Connector; Header; 3x2 Position)
signal-integrity model Connector
footprint SF8009
pins: 1, 2, 3, 4, 5, 6

## HGC2005LP4
designator U?  (value not drawn)
footprint QFN-24_L4.0-W4.0-P0.50-TL-EP2.6
pins: 1 D0, 2 VDD, 3 P/S, 4 GND, 5 ATTNIN, 6 GND, 7 GND, 8 GND, 9 GND, 10 GND, 11 GND, 12 GND, 13 GND, 14 ATTNOUT, 15 GND, 16 LE, 17 CLK, 18 SERNIN, 19 D6, 20 D5, 21 D4, 22 D3, 23 D2, 24 D1, 25 GND

## HSMS-285C
designator D?, comment SMS7630
Agilent Schottky Diode, Bridge Quad, HSMS-285C; Note: *
footprint SOT-323, HSMS-285C, SMS7630 (SOT-323/SC-70; 3 Leads; HSMS-285C)
footprint SOT-323, HSMS-285C, SMS7630 (SOT-323/SC-70; 3 Leads; HSMS-285C)
pins: 1 A, 2 K, 3 C

## IBSP3030ADJMS10R00
designator *
pins: 1 IN, 2 IN, 3 EN/UV, 4 PG, 5 ILIM, 6 PGFB, 7 SET, 8 GND, 9 OUTS, 10 OUT

## IND
designator L?, comment 8.2nH
Inductor, 80mA, ±10%; Part Number: L0603-10µ; Manufacturer: Taiyo Yuden; Manufacturer Part Number: LBMF1608T100K; 2nd source part number: 178-6105; Note: LBMF1608T100K 10µH 80mA 0603; Artikkelnr Noca: 33029314; Artikkelnr Simpro: N.A.; Datasheet: http://www.yuden.co.jp/ut/product/pdf/elb2_e.pdf; LatestRevisionDate: 2012-09-19; Pin Count: 2; Publisher: Nordic Semiconductor; Published: 2010-02-24; Value: 8.2nH; Supplier: Digi-Key; Supplier part number: 587-1714-1-ND; 2nd source Supplier: Farnell; Footprint Doc: 0603; ComponentLink1Description: Datasheet; ComponentLink2Description: Supplier link
footprint INDC1608X06L
footprint INDC1005X04L (Chip Inductor, 2-Leads, Body 1.0x0.5mm, IPC High Density)
footprint INDP4040X25N
footprint LC-0402_L
footprint N_0402_C
footprint 0402C
footprint 0402_Z
pins: 1, 2

## IND_1
designator L?, comment 1nH
Inductor, 80mA, ±10%; Part Number: L0603-10µ; Manufacturer: Taiyo Yuden; Manufacturer Part Number: LBMF1608T100K; 2nd source part number: 178-6105; Note: LBMF1608T100K 10µH 80mA 0603; Artikkelnr Noca: 33029314; Artikkelnr Simpro: N.A.; Datasheet: http://www.yuden.co.jp/ut/product/pdf/elb2_e.pdf; LatestRevisionDate: 2012-09-19; Pin Count: 2; Publisher: Nordic Semiconductor; Published: 2010-02-24; Value: 1nH; Supplier: Digi-Key; Supplier part number: 587-1714-1-ND; 2nd source Supplier: Farnell; Footprint Doc: 0603; ComponentLink1Description: Datasheet; ComponentLink2Description: Supplier link
footprint INDC1608X06L
footprint INDC1005X04L (Chip Inductor, 2-Leads, Body 1.0x0.5mm, IPC High Density)
footprint INDP4040X25N
footprint LC-0402_L
footprint 0402R
footprint 0402_Z
pins: 1, 2

## Inductor
designator L?, comment BEAD
Inductor; Code_IEC: 1005; Value: 10mH; Published: 8-Jun-2000; LatestRevisionDate: 29-May-2009; LatestRevisionNote: IPC-7351 Footprint Added.; PackageReference: 0402-A; Publisher: Altium Limited; PackageDescription: Chip Inductor; Code_JEITA: 0402
footprint 0402-A (Chip Inductor, Body 1.0x0.5mm, IPC High Density)
footprint INDC1608L (Chip Inductor, Body 1.6x0.8mm, IPC High Density)
footprint 2029 (Chip Inductor, Body 2.0x1.2mm, IPC High Density)
footprint 0603 (Chip Inductor, Body 0.6x0.3mm, IPC High Density)
footprint INDC3216 (Chip Inductor, Body 3.2x1.6mm, IPC High Density)
footprint INDC4532 (Chip Inductor, Body 4.5x3.2mm, IPC High Density)
simulation model INDUCTOR (Inductor)
signal-integrity model Inductor
footprint 0402C
footprint 0603C
footprint 0603_Z
pins: 1, 2

## INDUCTOR1
designator L?, comment MMZ1608B601C
INDUCTOR; Value: ?nH
footprint LC-0603_L
footprint 0402_Z
pins: 1, 2

## INDUCTOR1_1
designator L?
INDUCTOR; Value: 33nH
footprint LC-0603_L
footprint 0603R
footprint 0603_Z
pins: 1, 2

## Inductor_1
designator L?, comment 1.8nH
Inductor; Code_IEC: 1005; Value: 10mH; Published: 8-Jun-2000; LatestRevisionDate: 29-May-2009; LatestRevisionNote: IPC-7351 Footprint Added.; PackageReference: 0402-A; Publisher: Altium Limited; PackageDescription: Chip Inductor; Code_JEITA: 0402
footprint 0402-A (Chip Inductor, Body 1.0x0.5mm, IPC High Density)
footprint INDC1608L (Chip Inductor, Body 1.6x0.8mm, IPC High Density)
footprint 2029 (Chip Inductor, Body 2.0x1.2mm, IPC High Density)
footprint 0603 (Chip Inductor, Body 0.6x0.3mm, IPC High Density)
footprint INDC3216 (Chip Inductor, Body 3.2x1.6mm, IPC High Density)
footprint INDC4532 (Chip Inductor, Body 4.5x3.2mm, IPC High Density)
simulation model INDUCTOR (Inductor)
signal-integrity model Inductor
footprint 0402C
footprint 0402_Z
footprint LC-0402_L
pins: 1, 2

## Inductor_2
designator L?, comment 12 nH
Inductor; Code_IEC: 1005; Value: 10mH; Published: 8-Jun-2000; LatestRevisionDate: 29-May-2009; LatestRevisionNote: IPC-7351 Footprint Added.; PackageReference: 0402-A; Publisher: Altium Limited; PackageDescription: Chip Inductor; Code_JEITA: 0402
footprint 0402-A (Chip Inductor, Body 1.0x0.5mm, IPC High Density)
footprint INDC1608L (Chip Inductor, Body 1.6x0.8mm, IPC High Density)
footprint 2029 (Chip Inductor, Body 2.0x1.2mm, IPC High Density)
footprint 0603 (Chip Inductor, Body 0.6x0.3mm, IPC High Density)
footprint INDC3216 (Chip Inductor, Body 3.2x1.6mm, IPC High Density)
footprint INDC4532 (Chip Inductor, Body 4.5x3.2mm, IPC High Density)
simulation model INDUCTOR (Inductor)
signal-integrity model Inductor
footprint 0603C
footprint LC-0603_L
footprint 0402_Z
pins: 1, 2

## Inductor_3
designator L?, comment 100nH
Inductor; Code_IEC: 1005; Value: 10mH; Published: 8-Jun-2000; LatestRevisionDate: 29-May-2009; LatestRevisionNote: IPC-7351 Footprint Added.; PackageReference: 0402-A; Publisher: Altium Limited; PackageDescription: Chip Inductor; Code_JEITA: 0402
footprint 0402-A (Chip Inductor, Body 1.0x0.5mm, IPC High Density)
footprint INDC1608L (Chip Inductor, Body 1.6x0.8mm, IPC High Density)
footprint 2029 (Chip Inductor, Body 2.0x1.2mm, IPC High Density)
footprint 0603 (Chip Inductor, Body 0.6x0.3mm, IPC High Density)
footprint INDC3216 (Chip Inductor, Body 3.2x1.6mm, IPC High Density)
footprint INDC4532 (Chip Inductor, Body 4.5x3.2mm, IPC High Density)
simulation model INDUCTOR (Inductor)
signal-integrity model Inductor
footprint 0603R
footprint 0603_Z
pins: 1, 2

## Inductor_4
designator L?, comment 12nH
Inductor; Code_IEC: 1005; Value: 10mH; Published: 8-Jun-2000; LatestRevisionDate: 29-May-2009; LatestRevisionNote: IPC-7351 Footprint Added.; PackageReference: 0402-A; Publisher: Altium Limited; PackageDescription: Chip Inductor; Code_JEITA: 0402
footprint 0402-A (Chip Inductor, Body 1.0x0.5mm, IPC High Density)
footprint INDC1608L (Chip Inductor, Body 1.6x0.8mm, IPC High Density)
footprint 2029 (Chip Inductor, Body 2.0x1.2mm, IPC High Density)
footprint 0603 (Chip Inductor, Body 0.6x0.3mm, IPC High Density)
footprint INDC3216 (Chip Inductor, Body 3.2x1.6mm, IPC High Density)
footprint INDC4532 (Chip Inductor, Body 4.5x3.2mm, IPC High Density)
simulation model INDUCTOR (Inductor)
signal-integrity model Inductor
footprint 0603C
footprint 0402_Z
footprint 0402_Z
pins: 1, 2

## Inductor_5
designator L?, comment 33nH
Inductor; Code_IEC: 1005; Value: 10mH; Published: 8-Jun-2000; LatestRevisionDate: 29-May-2009; LatestRevisionNote: IPC-7351 Footprint Added.; PackageReference: 0402-A; Publisher: Altium Limited; PackageDescription: Chip Inductor; Code_JEITA: 0402
footprint 0402-A (Chip Inductor, Body 1.0x0.5mm, IPC High Density)
footprint INDC1608L (Chip Inductor, Body 1.6x0.8mm, IPC High Density)
footprint 2029 (Chip Inductor, Body 2.0x1.2mm, IPC High Density)
footprint 0603 (Chip Inductor, Body 0.6x0.3mm, IPC High Density)
footprint INDC3216 (Chip Inductor, Body 3.2x1.6mm, IPC High Density)
footprint INDC4532 (Chip Inductor, Body 4.5x3.2mm, IPC High Density)
simulation model INDUCTOR (Inductor)
signal-integrity model Inductor
footprint 0603C
footprint 0402_Z
footprint 0402_Z
pins: 1, 2

## Inductor_6
designator L?, comment 15nH
Inductor; Code_IEC: 1005; Value: 10mH; Published: 8-Jun-2000; LatestRevisionDate: 29-May-2009; LatestRevisionNote: IPC-7351 Footprint Added.; PackageReference: 0402-A; Publisher: Altium Limited; PackageDescription: Chip Inductor; Code_JEITA: 0402
footprint 0402-A (Chip Inductor, Body 1.0x0.5mm, IPC High Density)
footprint INDC1608L (Chip Inductor, Body 1.6x0.8mm, IPC High Density)
footprint 2029 (Chip Inductor, Body 2.0x1.2mm, IPC High Density)
footprint 0603 (Chip Inductor, Body 0.6x0.3mm, IPC High Density)
footprint INDC3216 (Chip Inductor, Body 3.2x1.6mm, IPC High Density)
footprint INDC4532 (Chip Inductor, Body 4.5x3.2mm, IPC High Density)
simulation model INDUCTOR (Inductor)
signal-integrity model Inductor
footprint 0603C
footprint 0402_Z
footprint 0402_Z
pins: 1, 2

## Inductor_7
designator L?, comment 56nH
Inductor; Code_IEC: 1005; Code_JEITA: 0402; Published: 8-Jun-2000; LatestRevisionDate: 29-May-2009; LatestRevisionNote: IPC-7351 Footprint Added.; PackageReference: 0402-A; Publisher: Altium Limited; PackageDescription: Chip Inductor
simulation model INDUCTOR (Inductor)
signal-integrity model Inductor
footprint 0402
footprint 0402_LAB
footprint 0402_Z
pins: 1, 2

## Inductor_8
designator L?, comment 18nH
Inductor; Code_IEC: 1005; Value: 10mH; Published: 8-Jun-2000; LatestRevisionDate: 29-May-2009; LatestRevisionNote: IPC-7351 Footprint Added.; PackageReference: 0402-A; Publisher: Altium Limited; PackageDescription: Chip Inductor; Code_JEITA: 0402
footprint 0402-A (Chip Inductor, Body 1.0x0.5mm, IPC High Density)
footprint INDC1608L (Chip Inductor, Body 1.6x0.8mm, IPC High Density)
footprint 2029 (Chip Inductor, Body 2.0x1.2mm, IPC High Density)
footprint 0603 (Chip Inductor, Body 0.6x0.3mm, IPC High Density)
footprint INDC3216 (Chip Inductor, Body 3.2x1.6mm, IPC High Density)
footprint INDC4532 (Chip Inductor, Body 4.5x3.2mm, IPC High Density)
simulation model INDUCTOR (Inductor)
signal-integrity model Inductor
footprint 0603C
footprint 0603_Z
footprint 0402_Z
pins: 1, 2

## Inductor_9
designator L?, comment 47nH
Inductor; Code_IEC: 1005; Value: 10mH; Published: 8-Jun-2000; LatestRevisionDate: 29-May-2009; LatestRevisionNote: IPC-7351 Footprint Added.; PackageReference: 0402-A; Publisher: Altium Limited; PackageDescription: Chip Inductor; Code_JEITA: 0402
footprint 0402-A (Chip Inductor, Body 1.0x0.5mm, IPC High Density)
footprint INDC1608L (Chip Inductor, Body 1.6x0.8mm, IPC High Density)
footprint 2029 (Chip Inductor, Body 2.0x1.2mm, IPC High Density)
footprint 0603 (Chip Inductor, Body 0.6x0.3mm, IPC High Density)
footprint INDC3216 (Chip Inductor, Body 3.2x1.6mm, IPC High Density)
footprint INDC4532 (Chip Inductor, Body 4.5x3.2mm, IPC High Density)
simulation model INDUCTOR (Inductor)
signal-integrity model Inductor
footprint 0603C
footprint 0402_Z
footprint 0402_Z
pins: 1, 2

## Inductor_10
designator L?, comment 100pF
Inductor; Code_IEC: 1005; Value: 10mH; Published: 8-Jun-2000; LatestRevisionDate: 29-May-2009; LatestRevisionNote: IPC-7351 Footprint Added.; PackageReference: 0402-A; Publisher: Altium Limited; PackageDescription: Chip Inductor; Code_JEITA: 0402
footprint 0402-A (Chip Inductor, Body 1.0x0.5mm, IPC High Density)
footprint INDC1608L (Chip Inductor, Body 1.6x0.8mm, IPC High Density)
footprint 2029 (Chip Inductor, Body 2.0x1.2mm, IPC High Density)
footprint 0603 (Chip Inductor, Body 0.6x0.3mm, IPC High Density)
footprint INDC3216 (Chip Inductor, Body 3.2x1.6mm, IPC High Density)
footprint INDC4532 (Chip Inductor, Body 4.5x3.2mm, IPC High Density)
simulation model INDUCTOR (Inductor)
signal-integrity model Inductor
footprint 0603C
footprint 0402C
footprint 0805C
footprint 0402_Z
pins: 1, 2

## Inductor_11
designator L?, comment 5.6n
Inductor; Code_IEC: 1005; Value: 10mH; Published: 8-Jun-2000; LatestRevisionDate: 29-May-2009; LatestRevisionNote: IPC-7351 Footprint Added.; PackageReference: 0402-A; Publisher: Altium Limited; PackageDescription: Chip Inductor; Code_JEITA: 0402
footprint 0402-A (Chip Inductor, Body 1.0x0.5mm, IPC High Density)
footprint INDC1608L (Chip Inductor, Body 1.6x0.8mm, IPC High Density)
footprint 2029 (Chip Inductor, Body 2.0x1.2mm, IPC High Density)
footprint 0603 (Chip Inductor, Body 0.6x0.3mm, IPC High Density)
footprint INDC3216 (Chip Inductor, Body 3.2x1.6mm, IPC High Density)
footprint INDC4532 (Chip Inductor, Body 4.5x3.2mm, IPC High Density)
simulation model INDUCTOR (Inductor)
signal-integrity model Inductor
footprint 0603C
footprint 0603_Z
footprint 0402_Z
pins: 1, 2

## Inductor_12
designator L?, comment 68nH
Inductor; Code_IEC: 1005; Value: 10mH; Published: 8-Jun-2000; LatestRevisionDate: 29-May-2009; LatestRevisionNote: IPC-7351 Footprint Added.; PackageReference: 0402-A; Publisher: Altium Limited; PackageDescription: Chip Inductor; Code_JEITA: 0402
footprint 0402-A (Chip Inductor, Body 1.0x0.5mm, IPC High Density)
footprint INDC1608L (Chip Inductor, Body 1.6x0.8mm, IPC High Density)
footprint 2029 (Chip Inductor, Body 2.0x1.2mm, IPC High Density)
footprint 0603 (Chip Inductor, Body 0.6x0.3mm, IPC High Density)
footprint INDC3216 (Chip Inductor, Body 3.2x1.6mm, IPC High Density)
footprint INDC4532 (Chip Inductor, Body 4.5x3.2mm, IPC High Density)
simulation model INDUCTOR (Inductor)
signal-integrity model Inductor
footprint 0603C
footprint 0603_Z
footprint 0402_Z
pins: 1, 2

## Inductor_13
designator L?, comment 10nH
Inductor; Code_IEC: 1005; Value: 10mH; Published: 8-Jun-2000; LatestRevisionDate: 29-May-2009; LatestRevisionNote: IPC-7351 Footprint Added.; PackageReference: 0402-A; Publisher: Altium Limited; PackageDescription: Chip Inductor; Code_JEITA: 0402
footprint 0402-A (Chip Inductor, Body 1.0x0.5mm, IPC High Density)
footprint INDC1608L (Chip Inductor, Body 1.6x0.8mm, IPC High Density)
footprint 2029 (Chip Inductor, Body 2.0x1.2mm, IPC High Density)
footprint 0603 (Chip Inductor, Body 0.6x0.3mm, IPC High Density)
footprint INDC3216 (Chip Inductor, Body 3.2x1.6mm, IPC High Density)
footprint INDC4532 (Chip Inductor, Body 4.5x3.2mm, IPC High Density)
simulation model INDUCTOR (Inductor)
signal-integrity model Inductor
footprint 0603C
footprint 0402C
footprint 0805C
footprint 0402_Z
pins: 1, 2

## Inductor_14
designator L?, comment 1.5 uH
Inductor; Code_IEC: 1005; Value: 10mH; Published: 8-Jun-2000; LatestRevisionDate: 29-May-2009; LatestRevisionNote: IPC-7351 Footprint Added.; PackageReference: 0402-A; Publisher: Altium Limited; PackageDescription: Chip Inductor; Code_JEITA: 0402
footprint 0402-A (Chip Inductor, Body 1.0x0.5mm, IPC High Density)
footprint INDC1608L (Chip Inductor, Body 1.6x0.8mm, IPC High Density)
footprint 2029 (Chip Inductor, Body 2.0x1.2mm, IPC High Density)
footprint 0603 (Chip Inductor, Body 0.6x0.3mm, IPC High Density)
footprint INDC3216 (Chip Inductor, Body 3.2x1.6mm, IPC High Density)
footprint INDC4532 (Chip Inductor, Body 4.5x3.2mm, IPC High Density)
simulation model INDUCTOR (Inductor)
signal-integrity model Inductor
footprint 0603C
footprint L-SMD-10
footprint INDC 4040X25N
pins: 1, 2

## Inductor_15
designator L?, comment 4.7uH
Inductor; Code_IEC: 1005; Value: 10mH; Published: 8-Jun-2000; LatestRevisionDate: 29-May-2009; LatestRevisionNote: IPC-7351 Footprint Added.; PackageReference: 0402-A; Publisher: Altium Limited; PackageDescription: Chip Inductor; Code_JEITA: 0402
footprint 0402-A (Chip Inductor, Body 1.0x0.5mm, IPC High Density)
footprint INDC1608L (Chip Inductor, Body 1.6x0.8mm, IPC High Density)
footprint 2029 (Chip Inductor, Body 2.0x1.2mm, IPC High Density)
footprint 0603 (Chip Inductor, Body 0.6x0.3mm, IPC High Density)
footprint INDC3216 (Chip Inductor, Body 3.2x1.6mm, IPC High Density)
footprint INDC4532 (Chip Inductor, Body 4.5x3.2mm, IPC High Density)
simulation model INDUCTOR (Inductor)
signal-integrity model Inductor
footprint 0603C
footprint L-SMD-10
footprint INDC 4040X25N
pins: 1, 2

## KH-IPEX-K501-29
designator RF?  (value not drawn)
Manufacturer: kinghelm(金航标); Add into BOM: yes; Connector Type: 板端; RF Series: IPEX; Interface Type: 内针; Number of Ports: 1; Impedance: 50Ω; Frequency-Max: 3GHz; Interface Diameter: 2mm; Interface Length/Height: 1.25mm; Name: KH-IPEX-K501-29; Symbol: KH-IPEX-K501-29; Device: KH-IPEX-K501-29; LCSC Part Name: IPEX 内针 1代; Supplier Part: C411563; Manufacturer Part: KH-IPEX-K501-29; Supplier Footprint: SMD; JLCPCB Part Class: Extended Part; Datasheet: https://atta.szlcsc.com/upload/public/pdf/source/20210317/C411563_B117163D510F1EF8C12FF082F555A034.pdf; Supplier: LCSC; Convert to PCB: yes; Style: -; Operating Temperature Range: -40℃~+90℃
footprint ANT-SMD_KH-IPEX-K501-29
3D model SMD_L2.6-W2.6-H1.3-LS3.1
pins: 1 SIG, 2 GND, 3 GND, 4 GND

## LED0
designator D?
Typical INFRARED GaAs LED; Published: 8-Jun-2000; LatestRevisionDate: 08-Jul-2005; LatestRevisionNote: Mech Layer 1 removed.; PackageReference: LED-0; Publisher: Altium Limited; PackageDescription: LED; 2 Leads
footprint LED-0 (LED; 2 Leads)
simulation model LED0 (Diode)
footprint 0603R
footprint 0603_Z
pins: 1 A, 2 K